# Altium integrated library ICM-20600.IntLib: 1 symbol
Pins are listed as number, name and electrical type; pins without a type are passive.

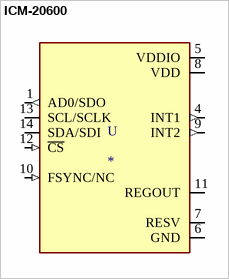
[diagram p0: symbol ICM-20600]

## ICM-20600
designator U
Accelerometer, Gyroscope, 6 Axis Sensor IÂ²C, SPI Output; MP: ICM-20600; MF: TDK InvenSense; DigiKey-Purchase-URL: https://snapeda.com/shop?store=DigiKey&id=537708; Digi-Key_Part_Number: 1428-1147-1-ND; Package: PQFN-14N TDK-InvenSense; Value: *; SnapEDA_Link: https://www.snapeda.com/parts/ICM-20600/TDK%20InvenSense/view-part/537708/?ref=snap
footprint PQFN50P250X300X97-14N
pins: 1 AD0/SDO (out), 4 INT1 (out), 5 VDDIO (power), 6 GND (power), 7 RESV (power), 8 VDD (power), 9 INT2 (out), 10 FSYNC/NC (in), 11 REGOUT, 12 ~{CS} (in), 13 SCL/SCLK (io), 14 SDA/SDI (io)